# Altium footprint library Miscellaneous Devices.PcbLib: 306 footprints (part 16 of 20)
Each footprint in its own frame and in the unit in brackets; x right, y up, seen from the top. Pads: shape width x height; smd on the part's side, far side on the other; paste and mask are expansions set on the pad; w line width, h text height; cw(c..) or ccw(c..) is an arc to the next point about the centre after c.
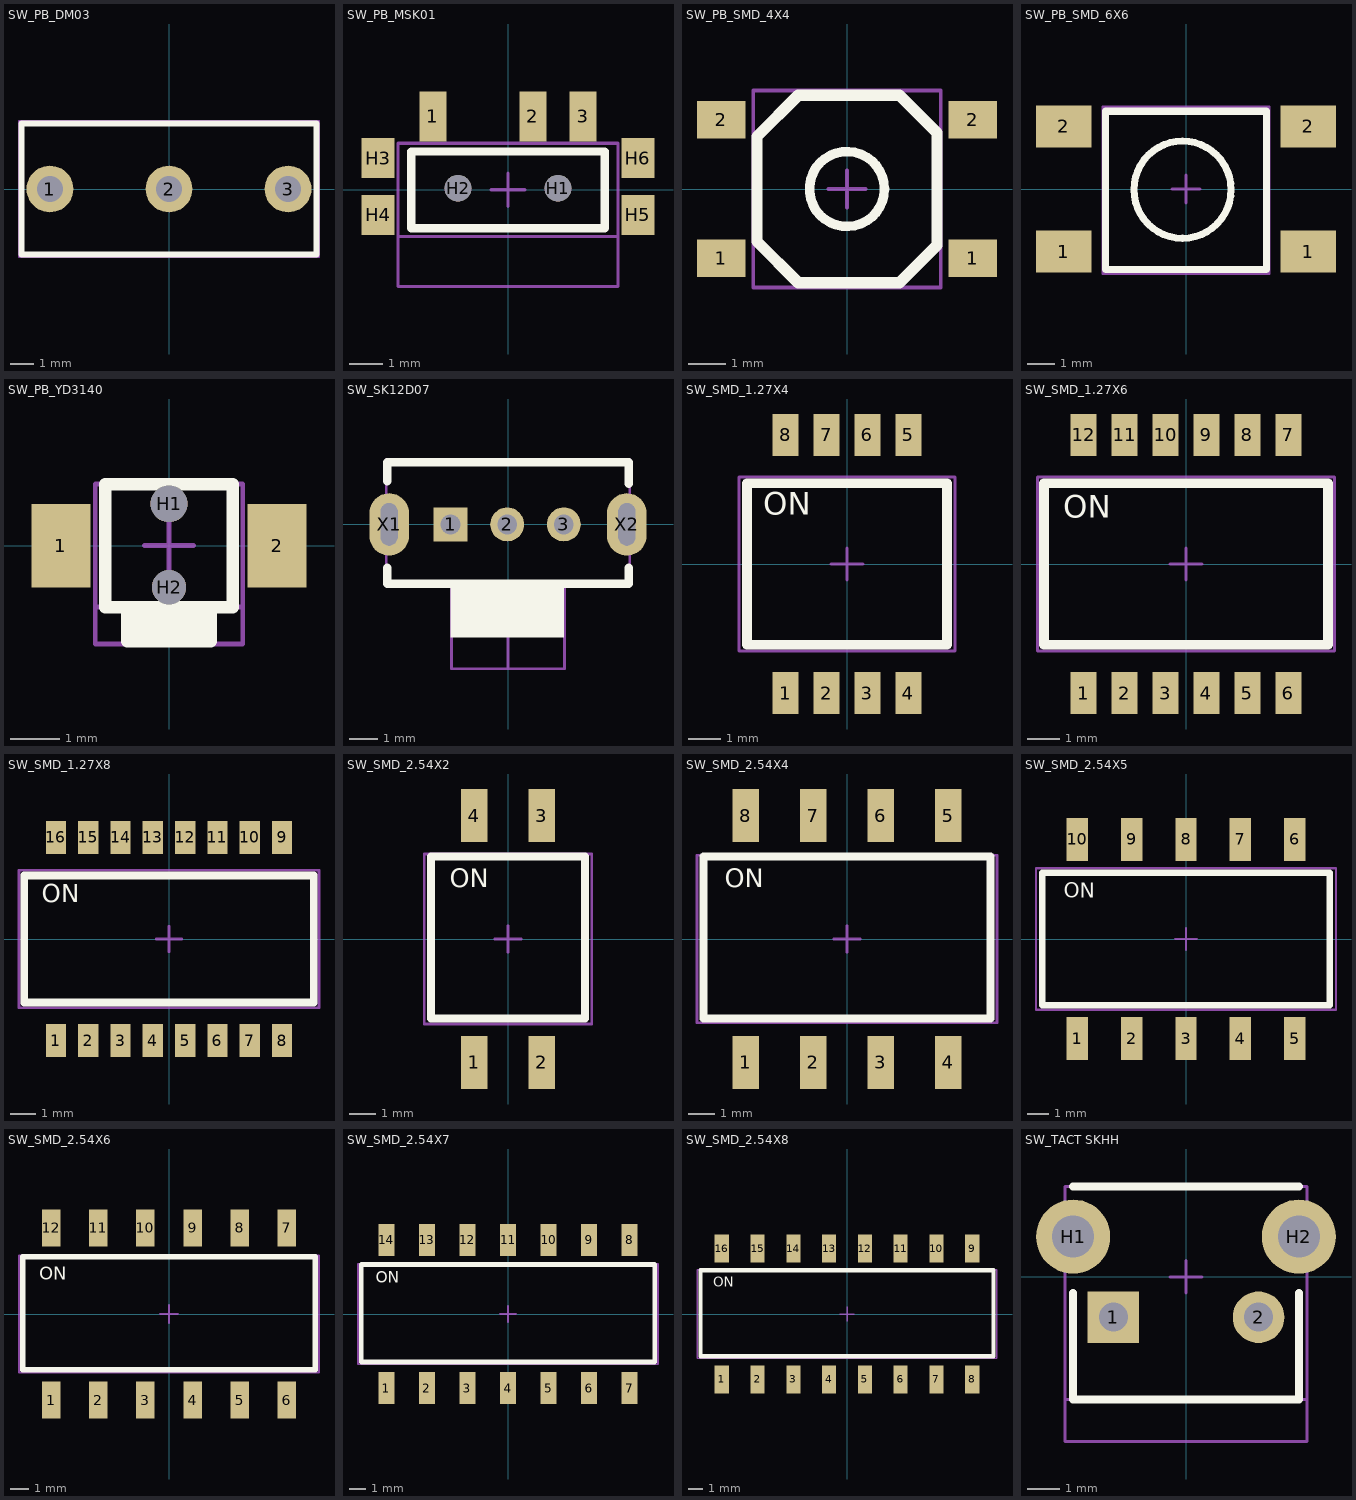
[diagram p15: the footprints below, top view; thin cyan lines are the x and y axes]

## SW_PB_DM03 [mm]
pads (3):
  round 2 hole 1.1: 1(-5.08,0) 2(0,0) 3(5.08,0)
Top Overlay:
  lines w0.254: -6.3,-2.8 -6.3,2.8 6.3,2.8 6.3,-2.8 -6.3,-2.8
Mechanical 15:
  lines w0.1: -6.4,-2.9 -6.4,2.9 6.4,2.9 6.4,-2.9 -6.4,-2.9
3D body: height 12.14, standoff -3.5, extent -6.422,-2.9 11.622,2.9

## SW_PB_MSK01 [mm]
pads (9):
  rect 0.8x1.5 smd: 1(-2.25,2.2) 2(0.75,2.2) 3(2.25,2.2)
  round 0.8 hole 0.8 unplated: H1(1.5,0.05) H2(-1.5,0.05)
  rect 1x1.2 smd: H3(-3.9,0.95) H4(-3.9,-0.75) H5(3.9,-0.75) H6(3.9,0.95)
Top Overlay:
  lines w0.254: -2.9,-1.15 2.9,-1.15 2.9,1.15 -2.9,1.15 -2.9,-1.15
Mechanical 15:
  lines w0.1: -0.5,0 0.5,0 ; 0,-0.5 0,0.5 ; -3.3,-1.4 -3.3,-2.9 3.3,-2.9 3.3,-1.4 ; -3.3,-1.4 -3.3,1.4 3.3,1.4 3.3,-1.4 ; -3.3,-1.4 3.3,-1.4
3D body: height 1.4, standoff -0.5, extent -3.85,-2.55 3.85,2.25

## SW_PB_SMD_4X4 [mm]
pads (4):
  rect 1.3x1 smd: 1(-3.35,-1.85) 1(3.35,-1.85) 2(-3.35,1.85) 2(3.35,1.85)
Top Overlay:
  circle w0.254: c0,0 r1
  lines w0.3: -2.4,-1.4 -2.4,1.4 -1.3,2.5 1.4,2.5 2.4,1.5 2.4,-1.5 1.4,-2.5 -1.3,-2.5 -2.4,-1.4
Mechanical 15:
  lines w0.1: -0.5,0 0.5,0 ; 0,-0.5 0,0.5 ; -2.5,-2.625 -2.5,2.625 2.5,2.625 2.5,-2.625 -2.5,-2.625
3D body: height 1.5, standoff 0, extent -3.2,-2.625 3.2,2.625

## SW_PB_SMD_6X6 [mm]
pads (4):
  rect 2x1.5 smd: 1(-4.4,-2.25) 1(4.4,-2.25) 2(-4.4,2.25) 2(4.4,2.25)
Top Overlay:
  circle w0.254: c-0.125,-0.024 r1.75
  lines w0.254: -2.9,-2.9 2.9,-2.9 2.9,2.8 -2.9,2.8 -2.9,-2.9
Mechanical 15:
  lines w0.1: -0.5,0 0.5,0 ; 0,-0.5 0,0.5 ; -3,-3.05 -3,2.95 3,2.95 3,-3.05 -3,-3.05
3D body: height 5.1, standoff -0.01, extent -4.975,-3.05 5.025,2.95

## SW_PB_YD3140 [mm]
pads (4):
  rect 1.2x1.7 smd: 1(-2.2,0) 2(2.2,0)
  round 0.75 hole 0.75 unplated: H1(0,0.85)
  round 0.7 hole 0.7 unplated: H2(0,-0.85)
Top Overlay:
  lines w0.254: -0.85,-1.3 -0.85,-1.95 0.85,-1.95 0.85,-1.3 ; -1.3,-1.25 1.3,-1.25 1.3,1.25 -1.3,1.25 -1.3,-1.25
  lines w0.7: -0.5,-1.55 0.5,-1.55
Mechanical 15:
  lines w0.1: -0.5,0 0.5,0 ; 0,-0.5 0,0.5 ; -1.5,-1.25 -1.5,-2 1.5,-2 1.5,-1.25 ; -1.5,-1.25 -1.5,1.25 1.5,1.25 1.5,-1.25 ; -1.5,-1.25 1.5,-1.25
3D body: height 0, standoff -0.5, extent -0.349,0.508 0.349,1.207
3D body: height 0, standoff -0.5, extent -0.349,-1.2 0.349,-0.501
3D body: height 1.5, standoff 0, extent -1.5,-1.2 1.5,1.2
3D body: height 0.3, standoff 0, extent 1.5,-0.7 2,0.7
3D body: height 0.3, standoff 0, extent -2,-0.7 -1.5,0.7
3D body: height 1.3, standoff 0.5, extent -0.9,-2 0.9,-1.2
3D body: height 1.5, standoff 0, extent -1.5,1.2 1.5,1.25
3D body: height 1.5, standoff 0, extent -1.5,-1.25 1.5,-1.2
3D body: height 1.6, standoff 1.5, extent -1.5,-1.25 1.5,1.25

## SW_SK12D07 [mm]
pads (5):
  rect 1.2x1.2 hole 0.7: 1(-2.027,0)
  round 1.2 hole 0.7: 2(-0.028,0) 3(1.973,0)
  oval 1.4x2.2 hole 0.6 slot 1.5 at 90 deg: X1(-4.2,0) X2(4.2,0)
Top Overlay:
  rectangle: -2.027,-4 1.973,-2.1
  lines w0.3: -4.272,-1.528 -4.272,-2.1 4.273,-2.1 4.273,-1.527 ; -4.272,1.528 -4.272,2.2 4.273,2.2 4.273,1.427
Mechanical 15:
  lines w0.1: -2,-2.1 -2,-5.1 0,-5.1 ; 0,-2.1 0,-5.1 ; 2,-2.1 2,-5.1 0,-5.1 ; -4.3,-2.1 4.3,-2.1 4.3,2.3 -4.3,2.3 -4.3,-2.1
3D body: height 4.7, standoff -3, extent -4.3,-4.7 4.3,2.3

## SW_SMD_1.27X4 [mm]
pads (8):
  rect 0.8x1.3 smd: 1(-1.905,-4) 2(-0.635,-4) 3(0.635,-4) 4(1.905,-4) 5(1.905,4) 6(0.635,4) 7(-0.635,4) 8(-1.905,4)
Top Overlay:
  lines w0.3: -3.1,-2.5 -3.1,2.5 3.1,2.5 3.1,-2.5 -3.1,-2.5
  text "ON" at -2.6,1.3 h1.2
Mechanical 15:
  lines w0.1: -0.5,0 0.5,0 ; 0,-0.5 0,0.5 ; -3.35,-2.7 3.35,-2.7 3.35,2.7 -3.35,2.7 -3.35,-2.7
3D body: height 2.35, standoff 0, extent -3.105,-4.066 3.105,4.066

## SW_SMD_1.27X6 [mm]
pads (12):
  rect 0.8x1.3 smd: 1(-3.175,-4) 2(-1.905,-4) 3(-0.635,-4) 4(0.635,-4) 5(1.905,-4) 6(3.175,-4) 7(3.175,4) 8(1.905,4) 9(0.635,4) 10(-0.635,4) 11(-1.905,4) 12(-3.175,4)
Top Overlay:
  lines w0.3: -4.4,-2.5 4.4,-2.5 4.4,2.5 -4.4,2.5 -4.4,-2.5
  text "ON" at -3.8,1.2 h1.2
Mechanical 15:
  lines w0.1: -0.5,0 0.5,0 ; 0,-0.5 0,0.5 ; -4.6,-2.7 -4.6,2.7 4.6,2.7 4.6,-2.7 -4.6,-2.7
3D body: height 2.36, standoff 0, extent -4.375,-4.066 4.225,4.066

## SW_SMD_1.27X8 [mm]
pads (16):
  rect 0.8x1.3 smd: 1(-4.445,-4) 2(-3.175,-4) 3(-1.905,-4) 4(-0.635,-4) 5(0.635,-4) 6(1.905,-4) 7(3.175,-4) 8(4.445,-4) 9(4.445,4) 10(3.175,4) 11(1.905,4) 12(0.635,4) 13(-0.635,4) 14(-1.905,4) 15(-3.175,4) 16(-4.445,4)
Top Overlay:
  lines w0.3: -5.7,-2.5 5.7,-2.5 5.7,2.5 -5.7,2.5 -5.7,-2.5
  text "ON" at -5,1.2 h1.2
Mechanical 15:
  lines w0.1: -0.5,0 0.5,0 ; 0,-0.5 0,0.5 ; -5.9,-2.7 -5.9,2.7 5.9,2.7 5.9,-2.7 -5.9,-2.7
3D body: height 2.36, standoff 0, extent -5.645,-4.066 5.515,4.066

## SW_SMD_2.54X2 [mm]
pads (4):
  rect 1x2 smd: 1(-1.27,-4.65) 2(1.27,-4.65) 3(1.27,4.65) 4(-1.27,4.65)
Top Overlay:
  lines w0.3: -2.9,-3 2.9,-3 2.9,3.1 -2.9,3.1 -2.9,-3
  text "ON" at -2.2,1.7 h1.2
Mechanical 15:
  lines w0.1: -0.5,0 0.5,0 ; 0,-0.5 0,0.5 ; -3.15,-3.2 -3.15,3.2 3.15,3.2 3.15,-3.2 -3.15,-3.2
3D body: height 4.2, standoff -0.05, extent -2.482,-4.9 2.482,5.01

## SW_SMD_2.54X4 [mm]
pads (8):
  rect 1x2 smd: 1(-3.81,-4.65) 2(-1.27,-4.65) 3(1.27,-4.65) 4(3.81,-4.65) 5(3.81,4.65) 6(1.27,4.65) 7(-1.27,4.65) 8(-3.81,4.65)
Top Overlay:
  lines w0.3: -5.4,-3 -5.4,3.1 5.4,3.1 5.4,-3 -5.4,-3
  text "ON" at -4.6,1.7 h1.2
Mechanical 15:
  lines w0.1: -0.5,0 0.5,0 ; 0,-0.5 0,0.5 ; -5.65,-3.15 -5.65,3.15 5.65,3.15 5.65,-3.15 -5.65,-3.15
3D body: height 4.2, standoff -0.05, extent -5.092,-4.95 5.072,4.96

## SW_SMD_2.54X5 [mm]
pads (10):
  rect 1x2 smd: 1(-5.08,-4.65) 2(-2.54,-4.65) 3(0,-4.65) 4(2.54,-4.65) 5(5.08,-4.65) 6(5.08,4.65) 7(2.54,4.65) 8(0,4.65) 9(-2.54,4.65) 10(-5.08,4.65)
Top Overlay:
  lines w0.3: -6.7,-3.1 6.7,-3.1 6.7,3.1 -6.7,3.1 -6.7,-3.1
  text "ON" at -5.7,1.7 h1.2
Mechanical 15:
  lines w0.1: -0.5,0 0.5,0 ; 0,-0.5 0,0.5 ; -7,-3.3 -7,3.3 7,3.3 7,-3.3 -7,-3.3
3D body: height 4.2, standoff -0.05, extent -6.362,-4.95 6.402,4.96

## SW_SMD_2.54X6 [mm]
pads (12):
  rect 1x2 smd: 1(-6.35,-4.65) 2(-3.81,-4.65) 3(-1.27,-4.65) 4(1.27,-4.65) 5(3.81,-4.65) 6(6.35,-4.65) 7(6.35,4.65) 8(3.81,4.65) 9(1.27,4.65) 10(-1.27,4.65) 11(-3.81,4.65) 12(-6.35,4.65)
Top Overlay:
  lines w0.3: -7.9,-3 7.9,-3 7.9,3.1 -7.9,3.1 -7.9,-3
  text "ON" at -7,1.6 h1.2
Mechanical 15:
  lines w0.1: -0.5,0 0.5,0 ; 0,-0.5 0,0.5 ; -8.1,-3.15 -8.1,3.15 8.1,3.15 8.1,-3.15 -8.1,-3.15
3D body: height 4.2, standoff -0.05, extent -7.632,-4.95 7.632,4.96

## SW_SMD_2.54X7 [mm]
pads (14):
  rect 1x2 smd: 1(-7.62,-4.65) 2(-5.08,-4.65) 3(-2.54,-4.65) 4(0,-4.65) 5(2.54,-4.65) 6(5.08,-4.65) 7(7.62,-4.65) 8(7.62,4.65) 9(5.08,4.65) 10(2.54,4.65) 11(0,4.65) 12(-2.54,4.65) 13(-5.08,4.65) 14(-7.62,4.65)
Top Overlay:
  lines w0.3: -9.2,-3 9.2,-3 9.2,3.1 -9.2,3.1 -9.2,-3
  text "ON" at -8.3,1.7 h1.2
Mechanical 15:
  lines w0.1: -0.5,0 0.5,0 ; 0,-0.5 0,0.5 ; -9.4,-3.15 -9.4,3.15 9.4,3.15 9.4,-3.15 -9.4,-3.15
3D body: height 4.2, standoff -0.05, extent -8.902,-4.95 8.962,4.96

## SW_SMD_2.54X8 [mm]
pads (16):
  rect 1x2 smd: 1(-8.89,-4.65) 2(-6.35,-4.65) 3(-3.81,-4.65) 4(-1.27,-4.65) 5(1.27,-4.65) 6(3.81,-4.65) 7(6.35,-4.65) 8(8.89,-4.65) 9(8.89,4.65) 10(6.35,4.65) 11(3.81,4.65) 12(1.27,4.65) 13(-1.27,4.65) 14(-3.81,4.65) 15(-6.35,4.65) 16(-8.89,4.65)
Top Overlay:
  lines w0.3: -10.4,-3 10.4,-3 10.4,3.1 -10.4,3.1 -10.4,-3
  text "ON" at -9.5,1.7 h1.2
Mechanical 15:
  lines w0.1: -0.5,0 0.5,0 ; 0,-0.5 0,0.5 ; -10.65,-3.15 10.65,-3.15 10.65,3.15 -10.65,3.15 -10.65,-3.15
3D body: height 4.2, standoff -0.05, extent -10.172,-4.95 10.192,4.96

## SW_TACT SKHH [mm]
pads (4):
  rect 1.6x1.6 hole 0.9: 1(-2.25,-1.25)
  round 1.6 hole 0.9: 2(2.25,-1.25)
  round 2.3 hole 1.3: H1(-3.5,1.25) H2(3.5,1.25)
Top Overlay:
  lines w0.254: -3.5,-0.5 -3.5,-3.8 3.5,-3.8 3.5,-0.5 ; -3.5,2.8 3.5,2.8
Mechanical 15:
  lines w0.1: -0.5,0 0.5,0 ; 0,-0.5 0,0.5 ; -3.75,-3.8 -3.75,-5.1 3.75,-5.1 3.75,-3.8 ; -3.75,-3.8 -3.75,2.8 3.75,2.8 3.75,-3.8 ; -3.75,-3.8 3.75,-3.8
3D body: height 7.37, standoff -3.5, extent -4.181,-5.15 4.181,2.82